# Altium integrated library Altium_Power_Supply_IC.IntLib: 99 symbols (part 2 of 3)
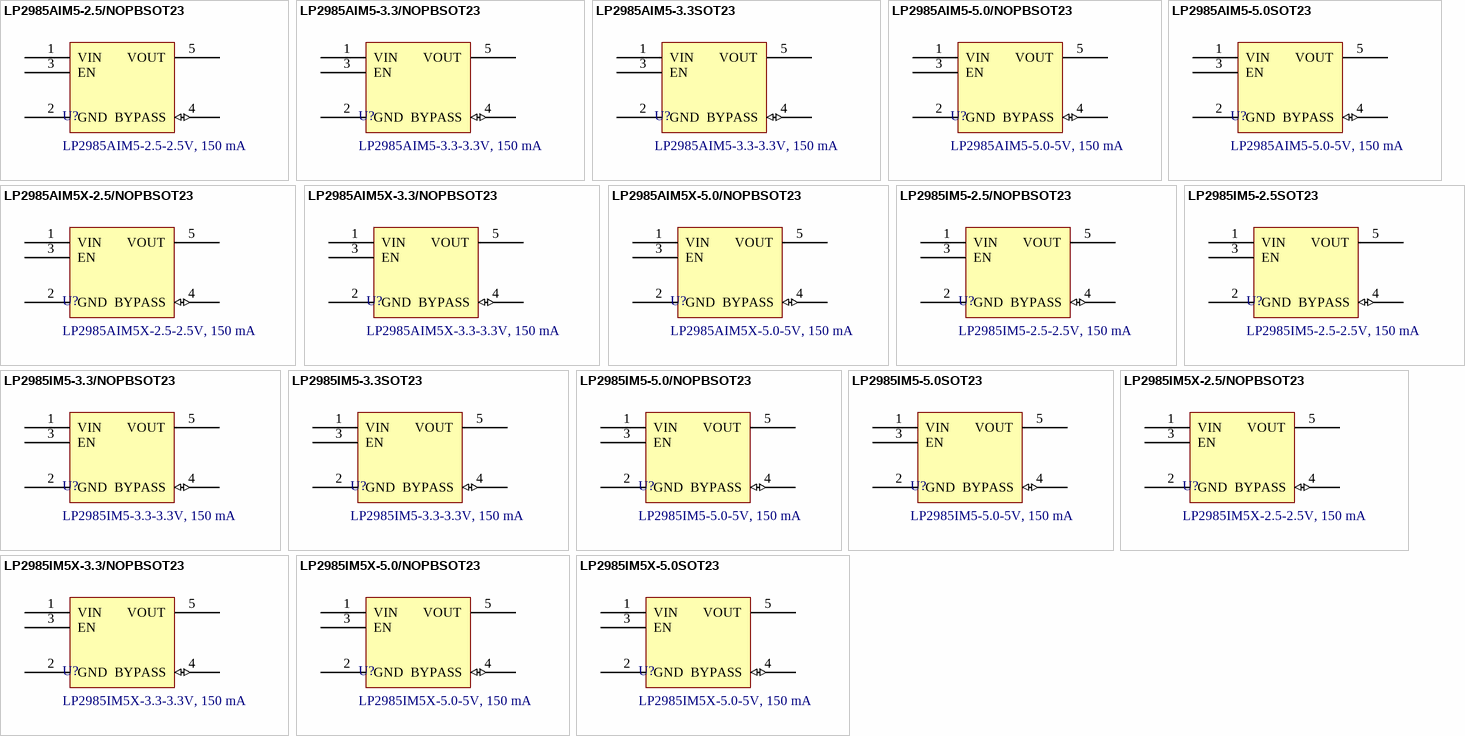
[diagram p12: symbols LP2985AIM5-2.5/NOPBSOT23 to LP2985IM5X-5.0SOT23]

## LP2985AIM5-5.0SOT23
designator U?, comment LP2985AIM5-5.0-5V, 150 mA
Out: 5V, 150 mA max; In: 2.5 V to 16 V; Pacakge: SOT-23-5; Manufacturer: Texas Instruments; Voltage Input: 2.5V - 16V; Current Output: 150 mA; Supplier 1 URL: https://www.mouser.vn/ProductDetail/Texas-Instruments/LP2985AIM5-5.0?qs=7lkVKPoqpba3%2FL%2F%2FI3%252BCew%3D%3D; Supplier 2 URL: https://www.digikey.com/en/products/detail/texas-instruments/LP2985AIM5-5-0/3701435; Supplier 3 URL: N/A; Value: LP2985AIM5-5.0-5V, 150 mA; Voltage Output: 5V; Manufacturer Part Number: LP2985AIM5-5.0; Mount: SMD/SMT; Operating Temperature Max: + 85 C; Operating Temperature Min: - 40 C; Package / Case: SOT-23-5; Packaging: Tape and Reel; Supplier 1: Mouser; Supplier 1 Part Number: 926-LP2985AIM5-50; Supplier 2: Digi-Key; Supplier 2 Part Number: LP2985AIM5-5.0TR-ND; Supplier 3: thegioiic; Supplier 3 Part Number: N/A; ComponentLink1Description: Datasheet; ComponentLink1URL: https://www.ti.com/lit/ds/symlink/lp2985.pdf?ts=1690340207505&ref_url=https%253A%252F%252Fwww.ti.com%252Fproduct%252FLP2985%253FkeyMatch%253DLM2985
footprint SOT23-5 (SOT143-4 as used in SP0503BAHTG)
pins: 1 VIN (power) "Input supply pin. Use a capacitor with a value of 1 µF or larger from this pin to ground.", 2 GND, 3 EN "Enable pin for the LDO. Driving the ON/OFF pin high enables the device. Driving this pin low", 4 BYPASS (io) "BYPASS pin to achieve low noise performance. Connecting an external capacitor between", 5 VOUT (power) "Output of the regulator. Use a capacitor with a value of 2.2 µF or larger from this pin to"

## LP2985AIM5X-2.5/NOPBSOT23
designator U?, comment LP2985AIM5X-2.5-2.5V, 150 mA
Out: 2.5V, 150 mA max; In: 2.5 V to 16 V; Pacakge: SOT-23-5; Manufacturer: Texas Instruments; Voltage Input: 2.5V - 16V; Current Output: 150 mA; Supplier 1 URL: https://www.mouser.vn/ProductDetail/Texas-Instruments/LP2985AIM5X-2.5-NOPB?qs=7lkVKPoqpbYgRY%252BBsOv68w%3D%3D; Supplier 2 URL: https://www.digikey.com/en/products/detail/texas-instruments/LP2985AIM5X-2-5-NOPB/367665; Supplier 3 URL: N/A; Value: LP2985AIM5X-2.5-2.5V, 150 mA; Voltage Output: 2.5V; Manufacturer Part Number: LP2985AIM5X-2.5; Mount: SMD/SMT; Operating Temperature Max: + 85 C; Operating Temperature Min: - 40 C; Package / Case: SOT-23-5; Packaging: Tape and Reel; Supplier 1: Mouser; Supplier 1 Part Number: 926-LP2985AIM5X25NPB; Supplier 2: Digi-Key; Supplier 2 Part Number: 296-LP2985AIM5X-2.5/NOPBTR-ND; Supplier 3: thegioiic; Supplier 3 Part Number: N/A; ComponentLink1Description: Datasheet; ComponentLink1URL: https://www.ti.com/lit/ds/symlink/lp2985.pdf?ts=1690340207505&ref_url=https%253A%252F%252Fwww.ti.com%252Fproduct%252FLP2985%253FkeyMatch%253DLM2985
footprint SOT23-5 (SOT143-4 as used in SP0503BAHTG)
pins: 1 VIN (power) "Input supply pin. Use a capacitor with a value of 1 µF or larger from this pin to ground.", 2 GND, 3 EN "Enable pin for the LDO. Driving the ON/OFF pin high enables the device. Driving this pin low", 4 BYPASS (io) "BYPASS pin to achieve low noise performance. Connecting an external capacitor between", 5 VOUT (power) "Output of the regulator. Use a capacitor with a value of 2.2 µF or larger from this pin to"

## LP2985AIM5X-3.3/NOPBSOT23
designator U?, comment LP2985AIM5X-3.3-3.3V, 150 mA
Out: 3.3V, 150 mA max; In: 2.5 V to 16 V; Pacakge: SOT-23-5; Manufacturer: Texas Instruments; Voltage Input: 2.5V - 16V; Current Output: 150 mA; Supplier 1 URL: https://www.mouser.vn/ProductDetail/Texas-Instruments/LP2985AIM5X-3.3-NOPB?qs=7lkVKPoqpbbp4pIqwI%2FBiQ%3D%3D; Supplier 2 URL: https://www.digikey.com/en/products/detail/texas-instruments/LP2985AIM5X-3-3-NOPB/367668; Supplier 3 URL: https://www.thegioiic.com/lp2985-33dbvr-ic-on-ap-3-3v-150ma; Value: LP2985AIM5X-3.3-3.3V, 150 mA; Voltage Output: 3.3V; Manufacturer Part Number: LP2985AIM5X-3.3; Mount: SMD/SMT; Operating Temperature Max: + 85 C; Operating Temperature Min: - 40 C; Package / Case: SOT-23-5; Packaging: Tape and Reel; Supplier 1: Mouser; Supplier 1 Part Number: 926-LP2985AIM5X33NPB; Supplier 2: Digi-Key; Supplier 2 Part Number: LP2985AIM5X-3.3/NOPBTR-ND; Supplier 3: thegioiic; Supplier 3 Part Number: N/A; ComponentLink1Description: Datasheet; ComponentLink1URL: https://www.ti.com/lit/ds/symlink/lp2985.pdf?ts=1690340207505&ref_url=https%253A%252F%252Fwww.ti.com%252Fproduct%252FLP2985%253FkeyMatch%253DLM2985
footprint SOT23-5 (SOT143-4 as used in SP0503BAHTG)
pins: 1 VIN (power) "Input supply pin. Use a capacitor with a value of 1 µF or larger from this pin to ground.", 2 GND, 3 EN "Enable pin for the LDO. Driving the ON/OFF pin high enables the device. Driving this pin low", 4 BYPASS (io) "BYPASS pin to achieve low noise performance. Connecting an external capacitor between", 5 VOUT (power) "Output of the regulator. Use a capacitor with a value of 2.2 µF or larger from this pin to"

## LP2985AIM5X-5.0/NOPBSOT23
designator U?, comment LP2985AIM5X-5.0-5V, 150 mA
Out: 5V, 150 mA max; In: 2.5 V to 16 V; Pacakge: SOT-23-5; Manufacturer: Texas Instruments; Voltage Input: 2.5V - 16V; Current Output: 150 mA; Supplier 1 URL: https://www.mouser.vn/ProductDetail/Texas-Instruments/LP2985AIM5X-5.0-NOPB?qs=7lkVKPoqpbZIPiotm0OF3A%3D%3D; Supplier 2 URL: https://www.digikey.com/en/products/detail/texas-instruments/LP2985AIM5X-5-0-NOPB/367669; Supplier 3 URL: N/A; Value: LP2985AIM5X-5.0-5V, 150 mA; Voltage Output: 5V; Manufacturer Part Number: LP2985AIM5X-5.0; Mount: SMD/SMT; Operating Temperature Max: + 85 C; Operating Temperature Min: - 40 C; Package / Case: SOT-23-5; Packaging: Tape and Reel; Supplier 1: Mouser; Supplier 1 Part Number: 926-LP2985AIM5X50NPB; Supplier 2: Digi-Key; Supplier 2 Part Number: LP2985AIM5X-5.0/NOPBTR-ND; Supplier 3: thegioiic; Supplier 3 Part Number: N/A; ComponentLink1Description: Datasheet; ComponentLink1URL: https://www.ti.com/lit/ds/symlink/lp2985.pdf?ts=1690340207505&ref_url=https%253A%252F%252Fwww.ti.com%252Fproduct%252FLP2985%253FkeyMatch%253DLM2985
footprint SOT23-5 (SOT143-4 as used in SP0503BAHTG)
pins: 1 VIN (power) "Input supply pin. Use a capacitor with a value of 1 µF or larger from this pin to ground.", 2 GND, 3 EN "Enable pin for the LDO. Driving the ON/OFF pin high enables the device. Driving this pin low", 4 BYPASS (io) "BYPASS pin to achieve low noise performance. Connecting an external capacitor between", 5 VOUT (power) "Output of the regulator. Use a capacitor with a value of 2.2 µF or larger from this pin to"

## LP2985IM5-2.5/NOPBSOT23
designator U?, comment LP2985IM5-2.5-2.5V, 150 mA
Out: 2.5V, 150 mA max; In: 2.5 V to 16 V; Pacakge: SOT-23-5; Manufacturer: Texas Instruments; Voltage Input: 2.5V - 16V; Current Output: 150 mA; Supplier 1 URL: https://www.mouser.vn/ProductDetail/Texas-Instruments/LP2985IM5-2.5-NOPB?qs=7lkVKPoqpbaMRafyDveXFA%3D%3D; Supplier 2 URL: https://www.digikey.com/en/products/detail/texas-instruments/LP2985IM5-2-5-NOPB/364601; Supplier 3 URL: N/A; Value: LP2985IM5-2.5-2.5V, 150 mA; Voltage Output: 2.5V; Manufacturer Part Number: LP2985IM5-2.5; Mount: SMD/SMT; Operating Temperature Max: + 85 C; Operating Temperature Min: - 40 C; Package / Case: SOT-23-5; Packaging: Tape and Reel; Supplier 1: Mouser; Supplier 1 Part Number: 926-2985IM5-2.5/NOPB; Supplier 2: Digi-Key; Supplier 2 Part Number: LP2985IM5-2.5/NOPBTR-ND; Supplier 3: thegioiic; Supplier 3 Part Number: N/A; ComponentLink1Description: Datasheet; ComponentLink1URL: https://www.ti.com/lit/ds/symlink/lp2985.pdf?ts=1690340207505&ref_url=https%253A%252F%252Fwww.ti.com%252Fproduct%252FLP2985%253FkeyMatch%253DLM2985
footprint SOT23-5 (SOT143-4 as used in SP0503BAHTG)
pins: 1 VIN (power) "Input supply pin. Use a capacitor with a value of 1 µF or larger from this pin to ground.", 2 GND, 3 EN "Enable pin for the LDO. Driving the ON/OFF pin high enables the device. Driving this pin low", 4 BYPASS (io) "BYPASS pin to achieve low noise performance. Connecting an external capacitor between", 5 VOUT (power) "Output of the regulator. Use a capacitor with a value of 2.2 µF or larger from this pin to"

## LP2985IM5-2.5SOT23
designator U?, comment LP2985IM5-2.5-2.5V, 150 mA
Out: 2.5V, 150 mA max; In: 2.5 V to 16 V; Pacakge: SOT-23-5; Manufacturer: Texas Instruments; Voltage Input: 2.5V - 16V; Current Output: 150 mA; Supplier 1 URL: https://www.mouser.vn/ProductDetail/Texas-Instruments/LP2985IM5-2.5?qs=7lkVKPoqpbbb%2FE%2FIZr0hmA%3D%3D; Supplier 2 URL: https://www.digikey.com/en/products/detail/texas-instruments/LP2985IM5-2-5/2352713; Supplier 3 URL: N/A; Value: LP2985IM5-2.5-2.5V, 150 mA; Voltage Output: 2.5V; Manufacturer Part Number: LP2985IM5-2.5; Mount: SMD/SMT; Operating Temperature Max: + 85 C; Operating Temperature Min: - 40 C; Package / Case: SOT-23-5; Packaging: Tape and Reel; Supplier 1: Mouser; Supplier 1 Part Number: 926-LP2985IM5-25; Supplier 2: Digi-Key; Supplier 2 Part Number: 296-36265-2-ND; Supplier 3: thegioiic; Supplier 3 Part Number: N/A; ComponentLink1Description: Datasheet; ComponentLink1URL: https://www.ti.com/lit/ds/symlink/lp2985.pdf?ts=1690340207505&ref_url=https%253A%252F%252Fwww.ti.com%252Fproduct%252FLP2985%253FkeyMatch%253DLM2985
footprint SOT23-5 (SOT143-4 as used in SP0503BAHTG)
pins: 1 VIN (power) "Input supply pin. Use a capacitor with a value of 1 µF or larger from this pin to ground.", 2 GND, 3 EN "Enable pin for the LDO. Driving the ON/OFF pin high enables the device. Driving this pin low", 4 BYPASS (io) "BYPASS pin to achieve low noise performance. Connecting an external capacitor between", 5 VOUT (power) "Output of the regulator. Use a capacitor with a value of 2.2 µF or larger from this pin to"

## LP2985IM5-3.3/NOPBSOT23
designator U?, comment LP2985IM5-3.3-3.3V, 150 mA
Out: 3.3V, 150 mA max; In: 2.5 V to 16 V; Pacakge: SOT-23-5; Manufacturer: Texas Instruments; Voltage Input: 2.5V - 16V; Current Output: 150 mA; Supplier 1 URL: https://www.mouser.vn/ProductDetail/Texas-Instruments/LP2985IM5-3.3-NOPB?qs=7lkVKPoqpbYPPbypQ1RJZg%3D%3D; Supplier 2 URL: https://www.digikey.com/en/products/detail/texas-instruments/LP2985IM5-3-3-NOPB/334961?s=N4IgTCBcDaIDIAUwE4AcBWAkgWXQWgGYA6AgegDkB5BAIRAF0BfIA; Supplier 3 URL: https://www.thegioiic.com/lp2985-33dbvr-ic-on-ap-3-3v-150ma; Value: LP2985IM5-3.3-3.3V, 150 mA; Voltage Output: 3.3V; Manufacturer Part Number: LP2985IM5-3.3; Mount: SMD/SMT; Operating Temperature Max: + 85 C; Operating Temperature Min: - 40 C; Package / Case: SOT-23-5; Packaging: Tape and Reel; Supplier 1: Mouser; Supplier 1 Part Number: 926-2985IM5-3.3/NOPB; Supplier 2: Digi-Key; Supplier 2 Part Number: LP2985IM5-3.3/NOPBTR-ND; Supplier 3: thegioiic; Supplier 3 Part Number: N/A; ComponentLink1Description: Datasheet; ComponentLink1URL: https://www.ti.com/lit/ds/symlink/lp2985.pdf?ts=1690340207505&ref_url=https%253A%252F%252Fwww.ti.com%252Fproduct%252FLP2985%253FkeyMatch%253DLM2985
footprint SOT23-5 (SOT143-4 as used in SP0503BAHTG)
pins: 1 VIN (power) "Input supply pin. Use a capacitor with a value of 1 µF or larger from this pin to ground.", 2 GND, 3 EN "Enable pin for the LDO. Driving the ON/OFF pin high enables the device. Driving this pin low", 4 BYPASS (io) "BYPASS pin to achieve low noise performance. Connecting an external capacitor between", 5 VOUT (power) "Output of the regulator. Use a capacitor with a value of 2.2 µF or larger from this pin to"

## LP2985IM5-3.3SOT23
designator U?, comment LP2985IM5-3.3-3.3V, 150 mA
Out: 3.3V, 150 mA max; In: 2.5 V to 16 V; Pacakge: SOT-23-5; Manufacturer: Texas Instruments; Voltage Input: 2.5V - 16V; Current Output: 150 mA; Supplier 1 URL: https://www.mouser.vn/ProductDetail/Texas-Instruments/LP2985IM5-3.3?qs=7lkVKPoqpbYyrbwrqf2JcA%3D%3D; Supplier 2 URL: https://www.digikey.com/en/products/detail/texas-instruments/LP2985IM5-3-3/3701436; Supplier 3 URL: https://www.thegioiic.com/lp2985-33dbvr-ic-on-ap-3-3v-150ma; Value: LP2985IM5-3.3-3.3V, 150 mA; Voltage Output: 3.3V; Manufacturer Part Number: LP2985IM5-3.3; Mount: SMD/SMT; Operating Temperature Max: + 85 C; Operating Temperature Min: - 40 C; Package / Case: SOT-23-5; Packaging: Tape and Reel; Supplier 1: Mouser; Supplier 1 Part Number: 926-LP2985IM5-33; Supplier 2: Digi-Key; Supplier 2 Part Number: LP2985IM5-3.3TR-ND; Supplier 3: thegioiic; Supplier 3 Part Number: N/A; ComponentLink1Description: Datasheet; ComponentLink1URL: https://www.ti.com/lit/ds/symlink/lp2985.pdf?ts=1690340207505&ref_url=https%253A%252F%252Fwww.ti.com%252Fproduct%252FLP2985%253FkeyMatch%253DLM2985
footprint SOT23-5 (SOT143-4 as used in SP0503BAHTG)
pins: 1 VIN (power) "Input supply pin. Use a capacitor with a value of 1 µF or larger from this pin to ground.", 2 GND, 3 EN "Enable pin for the LDO. Driving the ON/OFF pin high enables the device. Driving this pin low", 4 BYPASS (io) "BYPASS pin to achieve low noise performance. Connecting an external capacitor between", 5 VOUT (power) "Output of the regulator. Use a capacitor with a value of 2.2 µF or larger from this pin to"

## LP2985IM5-5.0/NOPBSOT23
designator U?, comment LP2985IM5-5.0-5V, 150 mA
Out: 5V, 150 mA max; In: 2.5 V to 16 V; Pacakge: SOT-23-5; Manufacturer: Texas Instruments; Voltage Input: 2.5V - 16V; Current Output: 150 mA; Supplier 1 URL: https://www.mouser.vn/ProductDetail/Texas-Instruments/LP2985IM5-5.0-NOPB?qs=7lkVKPoqpbY2QdMGYKhTqw%3D%3D; Supplier 2 URL: https://www.digikey.com/en/products/detail/texas-instruments/LP2985IM5-5-0-NOPB/334960?s=N4IgTCBcDaIDIAUwE4AcBWAkgWXQWnQDoAGAegDkB5BAIRAF0BfIA; Supplier 3 URL: N/A; Value: LP2985IM5-5.0-5V, 150 mA; Voltage Output: 5V; Manufacturer Part Number: LP2985IM5-5.0; Mount: SMD/SMT; Operating Temperature Max: + 85 C; Operating Temperature Min: - 40 C; Package / Case: SOT-23-5; Packaging: Tape and Reel; Supplier 1: Mouser; Supplier 1 Part Number: 926-LP2985IM55.0NOPB; Supplier 2: Digi-Key; Supplier 2 Part Number: LP2985IM5-5.0/NOPBTR-ND; Supplier 3: thegioiic; Supplier 3 Part Number: N/A; ComponentLink1Description: Datasheet; ComponentLink1URL: https://www.ti.com/lit/ds/symlink/lp2985.pdf?ts=1690340207505&ref_url=https%253A%252F%252Fwww.ti.com%252Fproduct%252FLP2985%253FkeyMatch%253DLM2985
footprint SOT23-5 (SOT143-4 as used in SP0503BAHTG)
pins: 1 VIN (power) "Input supply pin. Use a capacitor with a value of 1 µF or larger from this pin to ground.", 2 GND, 3 EN "Enable pin for the LDO. Driving the ON/OFF pin high enables the device. Driving this pin low", 4 BYPASS (io) "BYPASS pin to achieve low noise performance. Connecting an external capacitor between", 5 VOUT (power) "Output of the regulator. Use a capacitor with a value of 2.2 µF or larger from this pin to"

## LP2985IM5-5.0SOT23
designator U?, comment LP2985IM5-5.0-5V, 150 mA
Out: 5V, 150 mA max; In: 2.5 V to 16 V; Pacakge: SOT-23-5; Manufacturer: Texas Instruments; Voltage Input: 2.5V - 16V; Current Output: 150 mA; Supplier 1 URL: https://www.mouser.vn/ProductDetail/Texas-Instruments/LP2985IM5-5.0?qs=7lkVKPoqpbb8j6wBLu7kIA%3D%3D; Supplier 2 URL: https://www.digikey.com/en/products/detail/texas-instruments/LP2985IM5-5-0/3701437; Supplier 3 URL: N/A; Value: LP2985IM5-5.0-5V, 150 mA; Voltage Output: 5V; Manufacturer Part Number: LP2985IM5-5.0; Mount: SMD/SMT; Operating Temperature Max: + 85 C; Operating Temperature Min: - 40 C; Package / Case: SOT-23-5; Packaging: Tape and Reel; Supplier 1: Mouser; Supplier 1 Part Number: 926-LP2985IM5-50; Supplier 2: Digi-Key; Supplier 2 Part Number: LP2985IM5-5.0TR-ND; Supplier 3: thegioiic; Supplier 3 Part Number: N/A; ComponentLink1Description: Datasheet; ComponentLink1URL: https://www.ti.com/lit/ds/symlink/lp2985.pdf?ts=1690340207505&ref_url=https%253A%252F%252Fwww.ti.com%252Fproduct%252FLP2985%253FkeyMatch%253DLM2985
footprint SOT23-5 (SOT143-4 as used in SP0503BAHTG)
pins: 1 VIN (power) "Input supply pin. Use a capacitor with a value of 1 µF or larger from this pin to ground.", 2 GND, 3 EN "Enable pin for the LDO. Driving the ON/OFF pin high enables the device. Driving this pin low", 4 BYPASS (io) "BYPASS pin to achieve low noise performance. Connecting an external capacitor between", 5 VOUT (power) "Output of the regulator. Use a capacitor with a value of 2.2 µF or larger from this pin to"

## LP2985IM5X-2.5/NOPBSOT23
designator U?, comment LP2985IM5X-2.5-2.5V, 150 mA
Out: 2.5V, 150 mA max; In: 2.5 V to 16 V; Pacakge: SOT-23-5; Manufacturer: Texas Instruments; Voltage Input: 2.5V - 16V; Current Output: 150 mA; Supplier 1 URL: https://www.mouser.vn/ProductDetail/Texas-Instruments/LP2985IM5X-2.5-NOPB?qs=7lkVKPoqpbaNr2n6OKnAUQ%3D%3D; Supplier 2 URL: https://www.digikey.com/en/products/detail/texas-instruments/LP2985IM5X-2-5-NOPB/367675?s=N4IgTCBcDaIDIAUwE4AcBWAkgWXQDQFowA6dAegDkB5BAIRAF0BfIA; Supplier 3 URL: N/A; Value: LP2985IM5X-2.5-2.5V, 150 mA; Voltage Output: 2.5V; Manufacturer Part Number: LP2985IM5X-2.5; Mount: SMD/SMT; Operating Temperature Max: + 85 C; Operating Temperature Min: - 40 C; Package / Case: SOT-23-5; Packaging: Tape and Reel; Supplier 1: Mouser; Supplier 1 Part Number: 926-LP2985IM5X25NOPB; Supplier 2: Digi-Key; Supplier 2 Part Number: 296-37597-2-ND; Supplier 3: thegioiic; Supplier 3 Part Number: N/A; ComponentLink1Description: Datasheet; ComponentLink1URL: https://www.ti.com/lit/ds/symlink/lp2985.pdf?ts=1690340207505&ref_url=https%253A%252F%252Fwww.ti.com%252Fproduct%252FLP2985%253FkeyMatch%253DLM2985
footprint SOT23-5 (SOT143-4 as used in SP0503BAHTG)
pins: 1 VIN (power) "Input supply pin. Use a capacitor with a value of 1 µF or larger from this pin to ground.", 2 GND, 3 EN "Enable pin for the LDO. Driving the ON/OFF pin high enables the device. Driving this pin low", 4 BYPASS (io) "BYPASS pin to achieve low noise performance. Connecting an external capacitor between", 5 VOUT (power) "Output of the regulator. Use a capacitor with a value of 2.2 µF or larger from this pin to"

## LP2985IM5X-3.3/NOPBSOT23
designator U?, comment LP2985IM5X-3.3-3.3V, 150 mA
Out: 3.3V, 150 mA max; In: 2.5 V to 16 V; Pacakge: SOT-23-5; Manufacturer: Texas Instruments; Voltage Input: 2.5V - 16V; Current Output: 150 mA; Supplier 1 URL: https://www.mouser.vn/ProductDetail/Texas-Instruments/LP2985IM5X-3.3-NOPB?qs=7lkVKPoqpbarYOItF3geeg%3D%3D; Supplier 2 URL: https://www.digikey.com/en/products/detail/texas-instruments/LP2985IM5X-3-3-NOPB/367679; Supplier 3 URL: https://www.thegioiic.com/lp2985-33dbvr-ic-on-ap-3-3v-150ma; Value: LP2985IM5X-3.3-3.3V, 150 mA; Voltage Output: 3.3V; Manufacturer Part Number: LP2985IM5X-3.3; Mount: SMD/SMT; Operating Temperature Max: + 85 C; Operating Temperature Min: - 40 C; Package / Case: SOT-23-5; Packaging: Tape and Reel; Supplier 1: Mouser; Supplier 1 Part Number: 926-LP2985IM5X33NOPB; Supplier 2: Digi-Key; Supplier 2 Part Number: LP2985IM5X-3.3/NOPBTR-ND; Supplier 3: thegioiic; Supplier 3 Part Number: N/A; ComponentLink1Description: Datasheet; ComponentLink1URL: https://www.ti.com/lit/ds/symlink/lp2985.pdf?ts=1690340207505&ref_url=https%253A%252F%252Fwww.ti.com%252Fproduct%252FLP2985%253FkeyMatch%253DLM2985
footprint SOT23-5 (SOT143-4 as used in SP0503BAHTG)
pins: 1 VIN (power) "Input supply pin. Use a capacitor with a value of 1 µF or larger from this pin to ground.", 2 GND, 3 EN "Enable pin for the LDO. Driving the ON/OFF pin high enables the device. Driving this pin low", 4 BYPASS (io) "BYPASS pin to achieve low noise performance. Connecting an external capacitor between", 5 VOUT (power) "Output of the regulator. Use a capacitor with a value of 2.2 µF or larger from this pin to"

## LP2985IM5X-5.0/NOPBSOT23
designator U?, comment LP2985IM5X-5.0-5V, 150 mA
Out: 5V, 150 mA max; In: 2.5 V to 16 V; Pacakge: SOT-23-5; Manufacturer: Texas Instruments; Voltage Input: 2.5V - 16V; Current Output: 150 mA; Supplier 1 URL: https://www.mouser.vn/ProductDetail/Texas-Instruments/LP2985IM5X-5.0-NOPB?qs=7lkVKPoqpbZqObksDd83dw%3D%3D; Supplier 2 URL: https://www.digikey.com/en/products/detail/texas-instruments/LP2985IM5X-5-0-NOPB/367680; Supplier 3 URL: N/A; Value: LP2985IM5X-5.0-5V, 150 mA; Voltage Output: 5V; Manufacturer Part Number: LP2985IM5X-5.0; Mount: SMD/SMT; Operating Temperature Max: + 85 C; Operating Temperature Min: - 40 C; Package / Case: SOT-23-5; Packaging: Tape and Reel; Supplier 1: Mouser; Supplier 1 Part Number: 926-LP2985IM5X50NOPB; Supplier 2: Digi-Key; Supplier 2 Part Number: LP2985IM5X-5.0/NOPBTR-ND; Supplier 3: thegioiic; Supplier 3 Part Number: N/A; ComponentLink1Description: Datasheet; ComponentLink1URL: https://www.ti.com/lit/ds/symlink/lp2985.pdf?ts=1690340207505&ref_url=https%253A%252F%252Fwww.ti.com%252Fproduct%252FLP2985%253FkeyMatch%253DLM2985
footprint SOT23-5 (SOT143-4 as used in SP0503BAHTG)
pins: 1 VIN (power) "Input supply pin. Use a capacitor with a value of 1 µF or larger from this pin to ground.", 2 GND, 3 EN "Enable pin for the LDO. Driving the ON/OFF pin high enables the device. Driving this pin low", 4 BYPASS (io) "BYPASS pin to achieve low noise performance. Connecting an external capacitor between", 5 VOUT (power) "Output of the regulator. Use a capacitor with a value of 2.2 µF or larger from this pin to"

## LP2985IM5X-5.0SOT23
designator U?, comment LP2985IM5X-5.0-5V, 150 mA
Out: 5V, 150 mA max; In: 2.5 V to 16 V; Pacakge: SOT-23-5; Manufacturer: Texas Instruments; Voltage Input: 2.5V - 16V; Current Output: 150 mA; Supplier 1 URL: https://www.mouser.vn/ProductDetail/Texas-Instruments/LP2985IM5X-5.0?qs=7lkVKPoqpba%2FtUPktpLnaw%3D%3D; Supplier 2 URL: https://www.digikey.com/en/products/detail/texas-instruments/LP2985IM5X-5-0/3697186; Supplier 3 URL: N/A; Value: LP2985IM5X-5.0-5V, 150 mA; Voltage Output: 5V; Manufacturer Part Number: LP2985IM5X-5.0; Mount: SMD/SMT; Operating Temperature Max: + 85 C; Operating Temperature Min: - 40 C; Package / Case: SOT-23-5; Packaging: Tape and Reel; Supplier 1: Mouser; Supplier 1 Part Number: 926-LP2985IM5X-50; Supplier 2: Digi-Key; Supplier 2 Part Number: LP2985IM5X-5.0TR-ND; Supplier 3: thegioiic; Supplier 3 Part Number: N/A; ComponentLink1Description: Datasheet; ComponentLink1URL: https://www.ti.com/lit/ds/symlink/lp2985.pdf?ts=1690340207505&ref_url=https%253A%252F%252Fwww.ti.com%252Fproduct%252FLP2985%253FkeyMatch%253DLM2985
footprint SOT23-5 (SOT143-4 as used in SP0503BAHTG)
pins: 1 VIN (power) "Input supply pin. Use a capacitor with a value of 1 µF or larger from this pin to ground.", 2 GND, 3 EN "Enable pin for the LDO. Driving the ON/OFF pin high enables the device. Driving this pin low", 4 BYPASS (io) "BYPASS pin to achieve low noise performance. Connecting an external capacitor between", 5 VOUT (power) "Output of the regulator. Use a capacitor with a value of 2.2 µF or larger from this pin to"


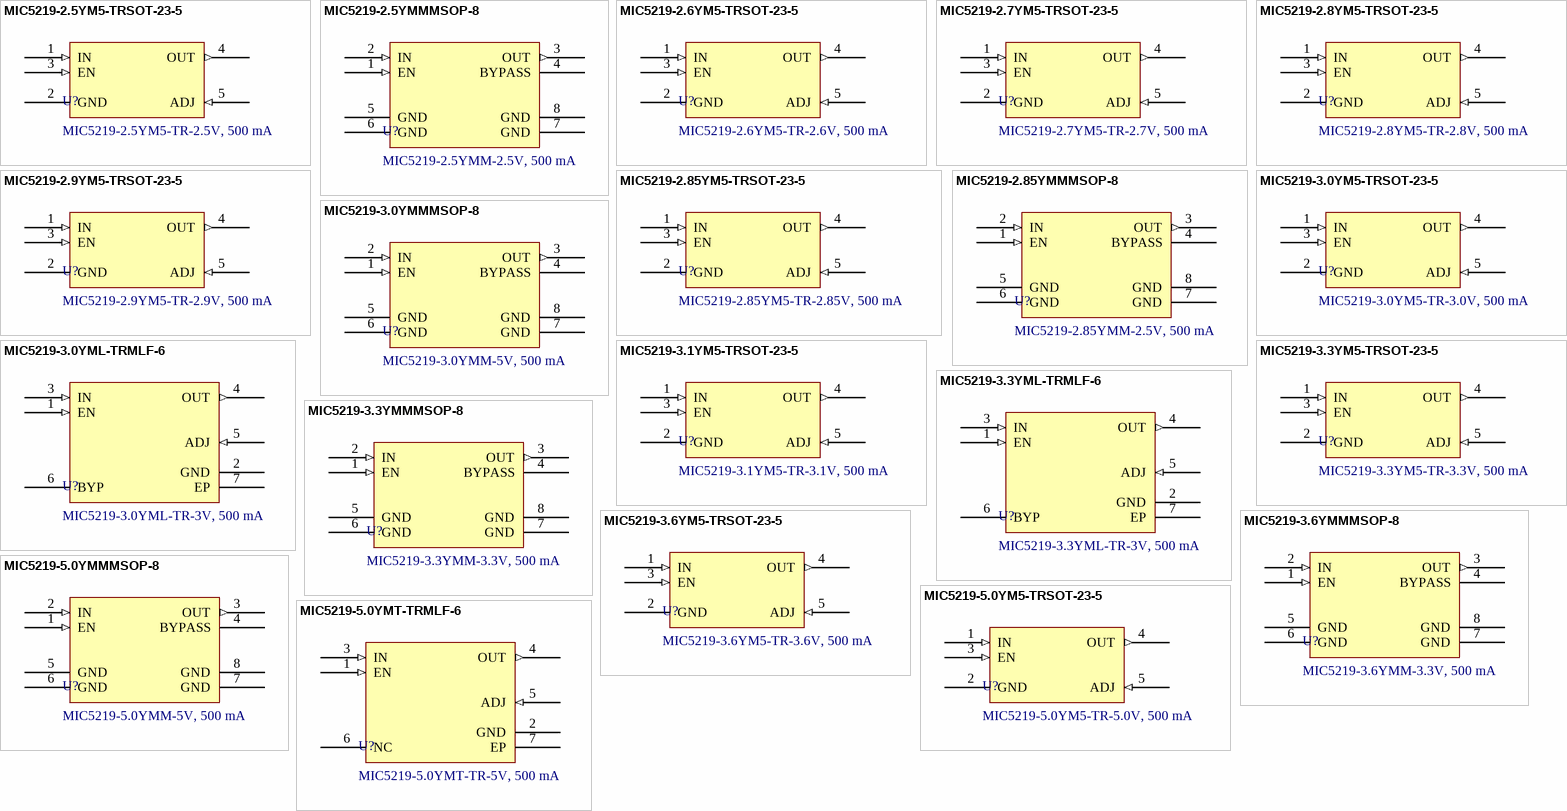
[diagram p7: symbols MIC5219-2.5YM5-TRSOT-23-5 to MIC5219-5.0YMT-TRMLF-6]

## MIC5219-2.5YM5-TRSOT-23-5
designator U?, comment MIC5219-2.5YM5-TR-2.5V, 500 mA
MIC5219-x family LDO Voltage Regulators, 2.5V output; Manufacturer: Microchip; PSRR: 75 dB; Dropout Voltage: 350-600 mV; Current Output: 500 mA; Voltage Input: 2.5V - 12V; Package / Case: SOT-23-5; Supplier 1 URL: https://www.mouser.vn/ProductDetail/Microchip-Technology/MIC5219-2.5YM5-TR?qs=U6T8BxXiZAXURjP%2FxpAn8w%3D%3D; Supplier 2 URL: https://www.digikey.com/en/products/detail/microchip-technology/MIC5219-2-5YM5-TR/1030543?s=N4IgTCBcDaILIEkDCBWMBGAnAWjAOhQE04VsAVAJRAF0BfIA; Supplier 3 URL: N/A; Value: MIC5219-2.5YM5-TR-2.5V, 500 mA; Voltage Output: 2.5V; Manufacturer Part Number: MIC5219-2.5YM5-TR; Mount: SMD/SMT; Operating Temperature Max: + 85 C; Operating Temperature Min: - 40 C; Supplier 1: Mouser; Supplier 1 Part Number: 998-MIC5219-2.5YM5TR; Supplier 2: Digi-Key; Supplier 2 Part Number: 576-2758-2-ND; Supplier 3: thegioiic; Supplier 3 Part Number: N/A; ComponentLink1Description: Datasheet; ComponentLink1URL: https://ww1.microchip.com/downloads/en/DeviceDoc/MIC5219-500mA-Peak-Output-LDO-Regulator-DS20006021A.pdf
footprint MIC5219-x.xYM5 (MIC5219-x.xYM5, SOT-23-5)
pins: 1 IN (in), 2 GND (power), 3 EN (in), 4 OUT (out), 5 ADJ (in)

## MIC5219-2.5YMMMSOP-8
designator U?, comment MIC5219-2.5YMM-2.5V, 500 mA
MIC5219-x family LDO Voltage Regulators, 2.5V output; Manufacturer: Microchip; PSRR: 75 dB; Dropout Voltage: 350-600 mV; Current Output: 500 mA; Voltage Input: 2.5V - 12V; Package / Case: MSOP-8; Supplier 1 URL: https://www.mouser.vn/ProductDetail/Microchip-Technology/MIC5219-2.5YMM?qs=kh6iOki%2FeLGSwVLHtzUtsQ%3D%3D; Supplier 2 URL: https://www.digikey.com/en/products/detail/microchip-technology/MIC5219-2-5YMM/1030544; Supplier 3 URL: N/A; Value: MIC5219-2.5YMM-2.5V, 500 mA; Voltage Output: 2.5V; Manufacturer Part Number: MIC5219-2.5YMM; Mount: SMD/SMT; Operating Temperature Max: + 85 C; Operating Temperature Min: - 40 C; Supplier 1: Mouser; Supplier 1 Part Number: 998-MIC5219-2.5YMM; Supplier 2: Digi-Key; Supplier 2 Part Number: 576-2376-ND; Supplier 3: thegioiic; Supplier 3 Part Number: N/A; ComponentLink1Description: Datasheet; ComponentLink1URL: https://ww1.microchip.com/downloads/en/DeviceDoc/MIC5219-500mA-Peak-Output-LDO-Regulator-DS20006021A.pdf
footprint MIC5219-x.xYMM (MIC5219-x.xYMM, SOT-23-5)
pins: 1 EN (in), 2 IN (in), 3 OUT (out), 4 BYPASS, 5 GND (power), 6 GND (power), 7 GND (power), 8 GND (power)

## MIC5219-2.6YM5-TRSOT-23-5
designator U?, comment MIC5219-2.6YM5-TR-2.6V, 500 mA
MIC5219-x family LDO Voltage Regulators, 2.6V output; Manufacturer: Microchip; PSRR: 75 dB; Dropout Voltage: 350-600 mV; Current Output: 500 mA; Voltage Input: 2.5V - 12V; Package / Case: SOT-23-5; Supplier 1 URL: https://www.mouser.vn/ProductDetail/Microchip-Technology/MIC5219-2.6YM5-TR?qs=U6T8BxXiZAU94MGLjAqlLA%3D%3D; Supplier 2 URL: https://www.digikey.com/en/products/detail/microchip-technology/MIC5219-2-6YM5-TR/1030548?s=N4IgTCBcDaILIEkDCBWMBGAnAWjAOgDYBNOFbAFQCUQBdAXyA; Supplier 3 URL: N/A; Value: MIC5219-2.6YM5-TR-2.6V, 500 mA; Voltage Output: 2.6V; Manufacturer Part Number: MIC5219-2.6YM5-TR; Mount: SMD/SMT; Operating Temperature Max: + 85 C; Operating Temperature Min: - 40 C; Supplier 1: Mouser; Supplier 1 Part Number: 998-MIC5219-2.6YM5TR; Supplier 2: Digi-Key; Supplier 2 Part Number: 576-2759-2-ND; Supplier 3: thegioiic; Supplier 3 Part Number: N/A; ComponentLink1Description: Datasheet; ComponentLink1URL: https://ww1.microchip.com/downloads/en/DeviceDoc/MIC5219-500mA-Peak-Output-LDO-Regulator-DS20006021A.pdf
footprint MIC5219-x.xYM5 (MIC5219-x.xYM5, SOT-23-5)
pins: 1 IN (in), 2 GND (power), 3 EN (in), 4 OUT (out), 5 ADJ (in)

## MIC5219-2.7YM5-TRSOT-23-5
designator U?, comment MIC5219-2.7YM5-TR-2.7V, 500 mA
MIC5219-x family LDO Voltage Regulators, 2.7V output; Manufacturer: Microchip; PSRR: 75 dB; Dropout Voltage: 350-600 mV; Current Output: 500 mA; Voltage Input: 2.5V - 12V; Package / Case: SOT-23-5; Supplier 1 URL: https://www.mouser.vn/ProductDetail/Microchip-Technology/MIC5219-2.7YM5-TR?qs=U6T8BxXiZAX%2Fh5H9qQkMlQ%3D%3D; Supplier 2 URL: https://www.digikey.com/en/products/detail/microchip-technology/MIC5219-2-7YM5-TR/1030550?s=N4IgTCBcDaILIEkDCBWMBGAnAWjAOgHYBNOFbAFQCUQBdAXyA; Supplier 3 URL: N/A; Value: MIC5219-2.7YM5-TR-2.7V, 500 mA; Voltage Output: 2.7V; Manufacturer Part Number: MIC5219-2.7YM5-TR; Mount: SMD/SMT; Operating Temperature Max: + 85 C; Operating Temperature Min: - 40 C; Supplier 1: Mouser; Supplier 1 Part Number: 998-MIC5219-2.7YM5TR; Supplier 2: Digi-Key; Supplier 2 Part Number: 576-2760-2-ND; Supplier 3: thegioiic; Supplier 3 Part Number: N/A; ComponentLink1Description: Datasheet; ComponentLink1URL: https://ww1.microchip.com/downloads/en/DeviceDoc/MIC5219-500mA-Peak-Output-LDO-Regulator-DS20006021A.pdf
footprint MIC5219-x.xYM5 (MIC5219-x.xYM5, SOT-23-5)
pins: 1 IN (in), 2 GND (power), 3 EN (in), 4 OUT (out), 5 ADJ (in)

## MIC5219-2.8YM5-TRSOT-23-5
designator U?, comment MIC5219-2.8YM5-TR-2.8V, 500 mA
MIC5219-x family LDO Voltage Regulators, 2.8V output; Manufacturer: Microchip; PSRR: 75 dB; Dropout Voltage: 350-600 mV; Current Output: 500 mA; Voltage Input: 2.5V - 12V; Package / Case: SOT-23-5; Supplier 1 URL: https://www.mouser.vn/ProductDetail/Microchip-Technology/MIC5219-2.8YM5-TR?qs=U6T8BxXiZAXy80gOmotftg%3D%3D; Supplier 2 URL: https://www.digikey.com/en/products/detail/microchip-technology/MIC5219-2-8YM5-TR/1030559?s=N4IgTCBcDaILIEkDCBWMBGAnAWjAOgA4BNOFbAFQCUQBdAXyA; Supplier 3 URL: N/A; Value: MIC5219-2.8YM5-TR-2.8V, 500 mA; Voltage Output: 2.8V; Manufacturer Part Number: MIC5219-2.8YM5-TR; Mount: SMD/SMT; Operating Temperature Max: + 85 C; Operating Temperature Min: - 40 C; Supplier 1: Mouser; Supplier 1 Part Number: 998-MIC5219-2.8YM5TR; Supplier 2: Digi-Key; Supplier 2 Part Number: 576-2762-2-ND; Supplier 3: thegioiic; Supplier 3 Part Number: N/A; ComponentLink1Description: Datasheet; ComponentLink1URL: https://ww1.microchip.com/downloads/en/DeviceDoc/MIC5219-500mA-Peak-Output-LDO-Regulator-DS20006021A.pdf
footprint MIC5219-x.xYM5 (MIC5219-x.xYM5, SOT-23-5)
pins: 1 IN (in), 2 GND (power), 3 EN (in), 4 OUT (out), 5 ADJ (in)

## MIC5219-2.9YM5-TRSOT-23-5
designator U?, comment MIC5219-2.9YM5-TR-2.9V, 500 mA
MIC5219-x family LDO Voltage Regulators, 2.9V output; Manufacturer: Microchip; PSRR: 75 dB; Dropout Voltage: 350-600 mV; Current Output: 500 mA; Voltage Input: 2.5V - 12V; Package / Case: SOT-23-5; Supplier 1 URL: https://www.mouser.vn/ProductDetail/Microchip-Technology/MIC5219-2.9YM5-TR?qs=U6T8BxXiZAUu28ZTWpa0Sw%3D%3D; Supplier 2 URL: https://www.digikey.com/en/products/detail/microchip-technology/MIC5219-2-9YM5-TR/1030562?s=N4IgTCBcDaILIEkDCBWMBGAnAWjAOkwE04VsAVAJRAF0BfIA; Supplier 3 URL: N/A; Value: MIC5219-2.9YM5-TR-2.9V, 500 mA; Voltage Output: 2.9V; Manufacturer Part Number: MIC5219-2.9YM5-TR; Mount: SMD/SMT; Operating Temperature Max: + 85 C; Operating Temperature Min: - 40 C; Supplier 1: Mouser; Supplier 1 Part Number: 998-MIC5219-2.9YM5TR; Supplier 2: Digi-Key; Supplier 2 Part Number: 576-2764-2-ND; Supplier 3: thegioiic; Supplier 3 Part Number: N/A; ComponentLink1Description: Datasheet; ComponentLink1URL: https://ww1.microchip.com/downloads/en/DeviceDoc/MIC5219-500mA-Peak-Output-LDO-Regulator-DS20006021A.pdf
footprint MIC5219-x.xYM5 (MIC5219-x.xYM5, SOT-23-5)
pins: 1 IN (in), 2 GND (power), 3 EN (in), 4 OUT (out), 5 ADJ (in)

## MIC5219-2.85YM5-TRSOT-23-5
designator U?, comment MIC5219-2.85YM5-TR-2.85V, 500 mA
MIC5219-x family LDO Voltage Regulators, 2.85V output; Manufacturer: Microchip; PSRR: 75 dB; Dropout Voltage: 350-600 mV; Current Output: 500 mA; Voltage Input: 2.5V - 12V; Package / Case: SOT-23-5; Supplier 1 URL: https://www.digikey.com/en/products/detail/microchip-technology/MIC5219-2-85YM5-TR/5700955; Supplier 2 URL: https://www.digikey.com/en/products/detail/microchip-technology/MIC5219-2-85YM5-TR/5700955; Supplier 3 URL: N/A; Value: MIC5219-2.85YM5-TR-2.85V, 500 mA; Voltage Output: 2.85V; Manufacturer Part Number: MIC5219-2.85YM5-TR; Mount: SMD/SMT; Operating Temperature Max: + 85 C; Operating Temperature Min: - 40 C; Supplier 1: Mouser; Supplier 1 Part Number: 998-MIC52192.85YM5TR; Supplier 2: Digi-Key; Supplier 2 Part Number: 576-2761-2-ND; Supplier 3: thegioiic; Supplier 3 Part Number: N/A; ComponentLink1Description: Datasheet; ComponentLink1URL: https://ww1.microchip.com/downloads/en/DeviceDoc/MIC5219-500mA-Peak-Output-LDO-Regulator-DS20006021A.pdf
footprint MIC5219-x.xYM5 (MIC5219-x.xYM5, SOT-23-5)
pins: 1 IN (in), 2 GND (power), 3 EN (in), 4 OUT (out), 5 ADJ (in)

## MIC5219-2.85YMMMSOP-8
designator U?, comment MIC5219-2.85YMM-2.5V, 500 mA
MIC5219-x family LDO Voltage Regulators, 2.85V output; Manufacturer: Microchip; PSRR: 75 dB; Dropout Voltage: 350-600 mV; Voltage Output: 2.5V; Current Output: 500 mA; Voltage Input: 2.5V - 12V; Package / Case: MSOP-8; Supplier 1 URL: https://www.mouser.vn/ProductDetail/Microchip-Technology/MIC5219-2.85YMM?qs=kh6iOki%2FeLGFTrYYM9DwNg%3D%3D; Supplier 2 URL: https://www.digikey.com/en/products/detail/microchip-technology/MIC5219-2-85YMM/1030555; Supplier 3 URL: N/A; Value: MIC5219-2.85YMM-2.5V, 500 mA; Manufacturer Part Number: MIC5219-2.85YMM; Mount: SMD/SMT; Operating Temperature Max: + 85 C; Operating Temperature Min: - 40 C; Supplier 1: Mouser; Supplier 1 Part Number: 998-MIC5219-2.85YMM; Supplier 2: Digi-Key; Supplier 2 Part Number: MIC5219-2.85YMM-ND; Supplier 3: thegioiic; Supplier 3 Part Number: N/A; ComponentLink1Description: Datasheet; ComponentLink1URL: https://ww1.microchip.com/downloads/en/DeviceDoc/MIC5219-500mA-Peak-Output-LDO-Regulator-DS20006021A.pdf
footprint MIC5219-x.xYMM (MIC5219-x.xYMM, SOT-23-5)
pins: 1 EN (in), 2 IN (in), 3 OUT (out), 4 BYPASS, 5 GND (power), 6 GND (power), 7 GND (power), 8 GND (power)

## MIC5219-3.0YM5-TRSOT-23-5
designator U?, comment MIC5219-3.0YM5-TR-3.0V, 500 mA
MIC5219-x family LDO Voltage Regulators, 3.0V output; Manufacturer: Microchip; PSRR: 75 dB; Dropout Voltage: 350-600 mV; Current Output: 500 mA; Voltage Input: 2.5V - 12V; Package / Case: SOT-23-5; Supplier 1 URL: https://www.mouser.vn/ProductDetail/Microchip-Technology/MIC5219-3.0YM5-TR?qs=U6T8BxXiZAWAOOoEZYaLhA%3D%3D; Supplier 2 URL: https://www.digikey.com/en/products/detail/microchip-technology/MIC5219-3-0YM5-TR/1030566?s=N4IgTCBcDaILIEkDCBWMBGAnAWgMwDoAGATThWwBUAlEAXQF8g; Supplier 3 URL: N/A; Value: MIC5219-3.0YM5-TR-3.0V, 500 mA; Voltage Output: 3.0V; Manufacturer Part Number: MIC5219-3.0YM5-TR; Mount: SMD/SMT; Operating Temperature Max: + 85 C; Operating Temperature Min: - 40 C; Supplier 1: Mouser; Supplier 1 Part Number: 998-MIC5219-3.0YM5TR; Supplier 2: Digi-Key; Supplier 2 Part Number: 576-2765-2-ND; Supplier 3: thegioiic; Supplier 3 Part Number: N/A; ComponentLink1Description: Datasheet; ComponentLink1URL: https://ww1.microchip.com/downloads/en/DeviceDoc/MIC5219-500mA-Peak-Output-LDO-Regulator-DS20006021A.pdf
footprint MIC5219-x.xYM5 (MIC5219-x.xYM5, SOT-23-5)
pins: 1 IN (in), 2 GND (power), 3 EN (in), 4 OUT (out), 5 ADJ (in)

## MIC5219-3.0YML-TRMLF-6
designator U?, comment MIC5219-3.0YML-TR-3V, 500 mA
MIC5219-x family LDO Voltage Regulators, 3.0V output; Manufacturer: Microchip; PSRR: 75 dB; Dropout Voltage: 350-600 mV; Voltage Output: 3V; Current Output: 500 mA; Voltage Input: 2.5V - 12V; Package / Case: MLF-6; Supplier 1 URL: https://www.mouser.vn/ProductDetail/Microchip-Technology/MIC5219-3.0YML-TR?qs=U6T8BxXiZAWwN17UQBAcEg%3D%3D; Supplier 2 URL: https://www.digikey.com/en/products/detail/microchip-technology/MIC5219-3-0YML-TR/1030567?s=N4IgTCBcDaILIEkDCBWMBGAnAWgMwDoAGATTgBlsAVAJRAF0BfIA; Supplier 3 URL: N/A; Value: MIC5219-3.0YML-TR-3V, 500 mA; Manufacturer Part Number: MIC5219-3.0YML-TR; Mount: SMD/SMT; Operating Temperature Max: + 85 C; Operating Temperature Min: - 40 C; Supplier 1: Mouser; Supplier 1 Part Number: 998-MIC5219-3.0YMLTR; Supplier 2: Digi-Key; Supplier 2 Part Number: 576-2766-2-ND; Supplier 3: thegioiic; Supplier 3 Part Number: N/A; ComponentLink1Description: Datasheet; ComponentLink1URL: https://ww1.microchip.com/downloads/en/DeviceDoc/MIC5219-500mA-Peak-Output-LDO-Regulator-DS20006021A.pdf
footprint MIC5219-x.xYML/MT (MIC5219-x.xYML/MT, 6-Pin MLF)
pins: 1 EN (in), 2 GND (power), 3 IN (in), 4 OUT (out), 5 ADJ (in), 6 BYP, 7 EP (power)

## MIC5219-3.0YMMMSOP-8
designator U?, comment MIC5219-3.0YMM-5V, 500 mA
MIC5219-x family LDO Voltage Regulators, 3.0V output; Manufacturer: Microchip; PSRR: 75 dB; Dropout Voltage: 350-600 mV; Voltage Output: 5V; Current Output: 500 mA; Voltage Input: 2.5V - 12V; Package / Case: MSOP-8; Supplier 1 URL: https://www.mouser.vn/ProductDetail/Microchip-Technology/MIC5219-3.0YMM?qs=kh6iOki%2FeLGPfoR%2FMRsl%252BQ%3D%3D; Supplier 2 URL: https://www.digikey.com/en/products/detail/microchip-technology/MIC5219-3-0YMM/1030568; Supplier 3 URL: N/A; Value: MIC5219-3.0YMM-5V, 500 mA; Manufacturer Part Number: MIC5219-3.0YMM; Mount: SMD/SMT; Operating Temperature Max: + 85 C; Operating Temperature Min: - 40 C; Supplier 1: Mouser; Supplier 1 Part Number: 998-MIC5219-3.0YMM; Supplier 2: Digi-Key; Supplier 2 Part Number: MIC5219-3.0YMM-ND; Supplier 3: thegioiic; Supplier 3 Part Number: N/A; ComponentLink1Description: Datasheet; ComponentLink1URL: https://ww1.microchip.com/downloads/en/DeviceDoc/MIC5219-500mA-Peak-Output-LDO-Regulator-DS20006021A.pdf
footprint MIC5219-x.xYMM (MIC5219-x.xYMM, SOT-23-5)
pins: 1 EN (in), 2 IN (in), 3 OUT (out), 4 BYPASS, 5 GND (power), 6 GND (power), 7 GND (power), 8 GND (power)

## MIC5219-3.1YM5-TRSOT-23-5
designator U?, comment MIC5219-3.1YM5-TR-3.1V, 500 mA
MIC5219-x family LDO Voltage Regulators, 3.1V output; Manufacturer: Microchip; PSRR: 75 dB; Dropout Voltage: 350-600 mV; Current Output: 500 mA; Voltage Input: 2.5V - 12V; Package / Case: SOT-23-5; Supplier 1 URL: https://www.mouser.vn/ProductDetail/Microchip-Technology/MIC5219-3.1YM5-TR?qs=U6T8BxXiZAXAsa136zQ9lw%3D%3D; Supplier 2 URL: https://www.digikey.com/en/products/detail/microchip-technology/MIC5219-3-1YM5-TR/1030570?s=N4IgTCBcDaILIEkDCBWMBGAnAWgMwDp0BNOFbAFQCUQBdAXyA; Supplier 3 URL: N/A; Value: MIC5219-3.1YM5-TR-3.1V, 500 mA; Voltage Output: 3.1V; Manufacturer Part Number: MIC5219-3.1YM5-TR; Mount: SMD/SMT; Operating Temperature Max: + 85 C; Operating Temperature Min: - 40 C; Supplier 1: Mouser; Supplier 1 Part Number: 998-MIC5219-3.1YM5TR; Supplier 2: Digi-Key; Supplier 2 Part Number: 576-2767-2-ND; Supplier 3: thegioiic; Supplier 3 Part Number: N/A; ComponentLink1Description: Datasheet; ComponentLink1URL: https://ww1.microchip.com/downloads/en/DeviceDoc/MIC5219-500mA-Peak-Output-LDO-Regulator-DS20006021A.pdf
footprint MIC5219-x.xYM5 (MIC5219-x.xYM5, SOT-23-5)
pins: 1 IN (in), 2 GND (power), 3 EN (in), 4 OUT (out), 5 ADJ (in)

## MIC5219-3.3YM5-TRSOT-23-5
designator U?, comment MIC5219-3.3YM5-TR-3.3V, 500 mA
MIC5219-x family LDO Voltage Regulators, 3.3V output; Manufacturer: Microchip; PSRR: 75 dB; Dropout Voltage: 350-600 mV; Current Output: 500 mA; Voltage Input: 2.5V - 12V; Package / Case: SOT-23-5; Supplier 1 URL: https://www.mouser.vn/ProductDetail/Microchip-Technology/MIC5219-3.3YM5-TR?qs=U6T8BxXiZAWojkIJMtSJlw%3D%3D; Supplier 2 URL: https://www.digikey.com/en/products/detail/microchip-technology/MIC5219-3-3YM5-TR/771750?s=N4IgTCBcDaILIEkDCBWMBGAnAWgMwDpcBNOFbAFQCUQBdAXyA; Supplier 3 URL: N/A; Value: MIC5219-3.3YM5-TR-3.3V, 500 mA; Voltage Output: 3.3V; Manufacturer Part Number: MIC5219-3.3YM5-TR; Mount: SMD/SMT; Operating Temperature Max: + 85 C; Operating Temperature Min: - 40 C; Supplier 1: Mouser; Supplier 1 Part Number: 998-MIC5219-3.3YM5TR; Supplier 2: Digi-Key; Supplier 2 Part Number: 576-1281-2-ND; Supplier 3: thegioiic; Supplier 3 Part Number: N/A; ComponentLink1Description: Datasheet; ComponentLink1URL: https://ww1.microchip.com/downloads/en/DeviceDoc/MIC5219-500mA-Peak-Output-LDO-Regulator-DS20006021A.pdf
footprint MIC5219-x.xYM5 (MIC5219-x.xYM5, SOT-23-5)
pins: 1 IN (in), 2 GND (power), 3 EN (in), 4 OUT (out), 5 ADJ (in)

## MIC5219-3.3YML-TRMLF-6
designator U?, comment MIC5219-3.3YML-TR-3V, 500 mA
MIC5219-x family LDO Voltage Regulators, 3.3V output; Manufacturer: Microchip; PSRR: 75 dB; Dropout Voltage: 350-600 mV; Voltage Output: 3V; Current Output: 500 mA; Voltage Input: 2.5V - 12V; Package / Case: MLF-6; Supplier 1 URL: https://www.mouser.vn/ProductDetail/Microchip-Technology/MIC5219-3.3YML-TR?qs=U6T8BxXiZAUE302TO%252BbaEg%3D%3D; Supplier 2 URL: https://www.digikey.com/en/products/detail/microchip-technology/MIC5219-3-3YML-TR/1030574?s=N4IgTCBcDaILIEkDCBWMBGAnAWgMwDpcBNOAGWwBUAlEAXQF8g; Supplier 3 URL: N/A; Value: MIC5219-3.3YML-TR-3V, 500 mA; Manufacturer Part Number: MIC5219-3.3YML-TR; Mount: SMD/SMT; Operating Temperature Max: + 85 C; Operating Temperature Min: - 40 C; Supplier 1: Mouser; Supplier 1 Part Number: 998-MIC5219-3.3YMLTR; Supplier 2: Digi-Key; Supplier 2 Part Number: 576-2768-2-NDQ; Supplier 3: thegioiic; Supplier 3 Part Number: N/A; ComponentLink1Description: Datasheet; ComponentLink1URL: https://ww1.microchip.com/downloads/en/DeviceDoc/MIC5219-500mA-Peak-Output-LDO-Regulator-DS20006021A.pdf
footprint MIC5219-x.xYML/MT (MIC5219-x.xYML/MT, 6-Pin MLF)
pins: 1 EN (in), 2 GND (power), 3 IN (in), 4 OUT (out), 5 ADJ (in), 6 BYP, 7 EP (power)

## MIC5219-3.3YMMMSOP-8
designator U?, comment MIC5219-3.3YMM-3.3V, 500 mA
MIC5219-x family LDO Voltage Regulators, 3.3V output; Manufacturer: Microchip; PSRR: 75 dB; Dropout Voltage: 350-600 mV; Current Output: 500 mA; Voltage Input: 2.5V - 12V; Package / Case: MSOP-8; Supplier 1 URL: https://www.mouser.vn/ProductDetail/Microchip-Technology/MIC5219-3.3YMM?qs=kh6iOki%2FeLEAgynv4GcWkQ%3D%3D; Supplier 2 URL: https://www.digikey.com/en/products/detail/microchip-technology/MIC5219-3-3YMM/1030575; Supplier 3 URL: N/A; Value: MIC5219-3.3YMM-3.3V, 500 mA; Voltage Output: 3.3V; Manufacturer Part Number: MIC5219-3.3YMM; Mount: SMD/SMT; Operating Temperature Max: + 85 C; Operating Temperature Min: - 40 C; Supplier 1: Mouser; Supplier 1 Part Number: 998-MIC5219-3.3YMM; Supplier 2: Digi-Key; Supplier 2 Part Number: 576-1827-5-ND; Supplier 3: thegioiic; Supplier 3 Part Number: N/A; ComponentLink1Description: Datasheet; ComponentLink1URL: https://ww1.microchip.com/downloads/en/DeviceDoc/MIC5219-500mA-Peak-Output-LDO-Regulator-DS20006021A.pdf
footprint MIC5219-x.xYMM (MIC5219-x.xYMM, SOT-23-5)
pins: 1 EN (in), 2 IN (in), 3 OUT (out), 4 BYPASS, 5 GND (power), 6 GND (power), 7 GND (power), 8 GND (power)

## MIC5219-3.6YM5-TRSOT-23-5
designator U?, comment MIC5219-3.6YM5-TR-3.6V, 500 mA
MIC5219-x family LDO Voltage Regulators, 3.6V output; Manufacturer: Microchip; PSRR: 75 dB; Dropout Voltage: 350-600 mV; Current Output: 500 mA; Voltage Input: 2.5V - 12V; Package / Case: SOT-23-5; Supplier 1 URL: https://www.mouser.vn/ProductDetail/Microchip-Technology/MIC5219-3.6YM5-TR?qs=U6T8BxXiZAWOHIj15bI33A%3D%3D; Supplier 2 URL: https://www.digikey.com/en/products/detail/microchip-technology/MIC5219-3-6YM5-TR/1030580?s=N4IgTCBcDaILIEkDCBWMBGAnAWgMwDoA2ATThWwBUAlEAXQF8g; Supplier 3 URL: N/A; Value: MIC5219-3.6YM5-TR-3.6V, 500 mA; Voltage Output: 3.6V; Manufacturer Part Number: MIC5219-3.6YM5-TR; Mount: SMD/SMT; Operating Temperature Max: + 85 C; Operating Temperature Min: - 40 C; Supplier 1: Mouser; Supplier 1 Part Number: 998-MIC5219-3.6YM5TR; Supplier 2: Digi-Key; Supplier 2 Part Number: 576-2769-2-ND; Supplier 3: thegioiic; Supplier 3 Part Number: N/A; ComponentLink1Description: Datasheet; ComponentLink1URL: https://ww1.microchip.com/downloads/en/DeviceDoc/MIC5219-500mA-Peak-Output-LDO-Regulator-DS20006021A.pdf
footprint MIC5219-x.xYM5 (MIC5219-x.xYM5, SOT-23-5)
pins: 1 IN (in), 2 GND (power), 3 EN (in), 4 OUT (out), 5 ADJ (in)

## MIC5219-3.6YMMMSOP-8
designator U?, comment MIC5219-3.6YMM-3.3V, 500 mA
MIC5219-x family LDO Voltage Regulators, 3.6V output; Manufacturer: Microchip; PSRR: 75 dB; Dropout Voltage: 350-600 mV; Voltage Output: 3.3V; Current Output: 500 mA; Voltage Input: 2.5V - 12V; Package / Case: MSOP-8; Supplier 1 URL: https://www.mouser.vn/ProductDetail/Microchip-Technology/MIC5219-3.6YMM?qs=kh6iOki%2FeLHQy6u%252Bz%2FlMaQ%3D%3D; Supplier 2 URL: https://www.digikey.com/en/products/detail/microchip-technology/MIC5219-3-6YMM/1030581; Supplier 3 URL: N/A; Value: MIC5219-3.6YMM-3.3V, 500 mA; Manufacturer Part Number: MIC5219-3.6YMM; Mount: SMD/SMT; Operating Temperature Max: + 85 C; Operating Temperature Min: - 40 C; Supplier 1: Mouser; Supplier 1 Part Number: 998-MIC5219-3.6YMM; Supplier 2: Digi-Key; Supplier 2 Part Number: MIC5219-3.6YMM-ND; Supplier 3: thegioiic; Supplier 3 Part Number: N/A; ComponentLink1Description: Datasheet; ComponentLink1URL: https://ww1.microchip.com/downloads/en/DeviceDoc/MIC5219-500mA-Peak-Output-LDO-Regulator-DS20006021A.pdf
footprint MIC5219-x.xYMM (MIC5219-x.xYMM, SOT-23-5)
pins: 1 EN (in), 2 IN (in), 3 OUT (out), 4 BYPASS, 5 GND (power), 6 GND (power), 7 GND (power), 8 GND (power)

## MIC5219-5.0YM5-TRSOT-23-5
designator U?, comment MIC5219-5.0YM5-TR-5.0V, 500 mA
MIC5219-x family LDO Voltage Regulators, 5.0V output; Manufacturer: Microchip; PSRR: 75 dB; Dropout Voltage: 350-600 mV; Current Output: 500 mA; Voltage Input: 2.5V - 12V; Package / Case: SOT-23-5; Supplier 1 URL: https://www.mouser.vn/ProductDetail/Microchip-Technology/MIC5219-5.0YM5-TR?qs=U6T8BxXiZAXThrqii9sAvA%3D%3D; Supplier 2 URL: https://www.digikey.com/en/products/detail/microchip-technology/MIC5219-5-0YM5-TR/1030586?s=N4IgTCBcDaILIEkDCBWMBGAnAWhQOgAYBNOFbAFQCUQBdAXyA; Supplier 3 URL: N/A; Value: MIC5219-5.0YM5-TR-5.0V, 500 mA; Voltage Output: 5.0V; Manufacturer Part Number: MIC5219-5.0YM5-TR; Mount: SMD/SMT; Operating Temperature Max: + 85 C; Operating Temperature Min: - 40 C; Supplier 1: Mouser; Supplier 1 Part Number: 998-MIC5219-5.0YM5TR; Supplier 2: Digi-Key; Supplier 2 Part Number: 576-2770-2-ND; Supplier 3: thegioiic; Supplier 3 Part Number: N/A; ComponentLink1Description: Datasheet; ComponentLink1URL: https://ww1.microchip.com/downloads/en/DeviceDoc/MIC5219-500mA-Peak-Output-LDO-Regulator-DS20006021A.pdf
footprint MIC5219-x.xYM5 (MIC5219-x.xYM5, SOT-23-5)
pins: 1 IN (in), 2 GND (power), 3 EN (in), 4 OUT (out), 5 ADJ (in)

## MIC5219-5.0YMMMSOP-8
designator U?, comment MIC5219-5.0YMM-5V, 500 mA
MIC5219-x family LDO Voltage Regulators, 5.0V output; Manufacturer: Microchip; PSRR: 75 dB; Dropout Voltage: 350-600 mV; Voltage Output: 5V; Current Output: 500 mA; Voltage Input: 2.5V - 12V; Package / Case: MSOP-8; Supplier 1 URL: https://www.mouser.vn/ProductDetail/Microchip-Technology/MIC5219-5.0YMM?qs=kh6iOki%2FeLGcAZQ4JCOeow%3D%3D; Supplier 2 URL: https://www.digikey.com/en/products/detail/microchip-technology/MIC5219-5-0YMM/1030587; Supplier 3 URL: N/A; Value: MIC5219-5.0YMM-5V, 500 mA; Manufacturer Part Number: MIC5219-5.0YMM; Mount: SMD/SMT; Operating Temperature Max: + 85 C; Operating Temperature Min: - 40 C; Supplier 1: Mouser; Supplier 1 Part Number: 998-MIC5219-5.0YMM; Supplier 2: Digi-Key; Supplier 2 Part Number: 576-1828-5-ND; Supplier 3: thegioiic; Supplier 3 Part Number: N/A; ComponentLink1Description: Datasheet; ComponentLink1URL: https://ww1.microchip.com/downloads/en/DeviceDoc/MIC5219-500mA-Peak-Output-LDO-Regulator-DS20006021A.pdf
footprint MIC5219-x.xYMM (MIC5219-x.xYMM, SOT-23-5)
pins: 1 EN (in), 2 IN (in), 3 OUT (out), 4 BYPASS, 5 GND (power), 6 GND (power), 7 GND (power), 8 GND (power)

## MIC5219-5.0YMT-TRMLF-6
designator U?, comment MIC5219-5.0YMT-TR-5V, 500 mA
MIC5219-x family LDO Voltage Regulators, 5.0V output; Manufacturer: Microchip; PSRR: 75 dB; Dropout Voltage: 350-600 mV; Voltage Output: 5V; Current Output: 500 mA; Voltage Input: 2.5V - 12V; Package / Case: MLF-6; Supplier 1 URL: https://www.mouser.vn/ProductDetail/Microchip-Technology/MIC5219-5.0YMT-TR?qs=U6T8BxXiZAUlqYSj5RtOQw%3D%3D; Supplier 2 URL: https://www.digikey.com/en/products/detail/microchip-technology/MIC5219-5-0YMT-TR/2095492?s=N4IgTCBcDaILIEkDCBWMBGAnAWhQOgAYBNOAFW1ICUQBdAXyA; Supplier 3 URL: N/A; Value: MIC5219-5.0YMT-TR-5V, 500 mA; Manufacturer Part Number: MIC5219-5.0YMT-TR; Mount: SMD/SMT; Operating Temperature Max: + 85 C; Operating Temperature Min: - 40 C; Supplier 1: Mouser; Supplier 1 Part Number: 998-MIC5219-5.0YMTTR; Supplier 2: Digi-Key; Supplier 2 Part Number: 576-3521-2-ND; Supplier 3: thegioiic; Supplier 3 Part Number: N/A; ComponentLink1Description: Datasheet; ComponentLink1URL: https://ww1.microchip.com/downloads/en/DeviceDoc/MIC5219-500mA-Peak-Output-LDO-Regulator-DS20006021A.pdf
footprint MIC5219-x.xYML/MT (MIC5219-x.xYML/MT, 6-Pin MLF)
pins: 1 EN (in), 2 GND (power), 3 IN (in), 4 OUT (out), 5 ADJ (in), 6 NC, 7 EP (power)


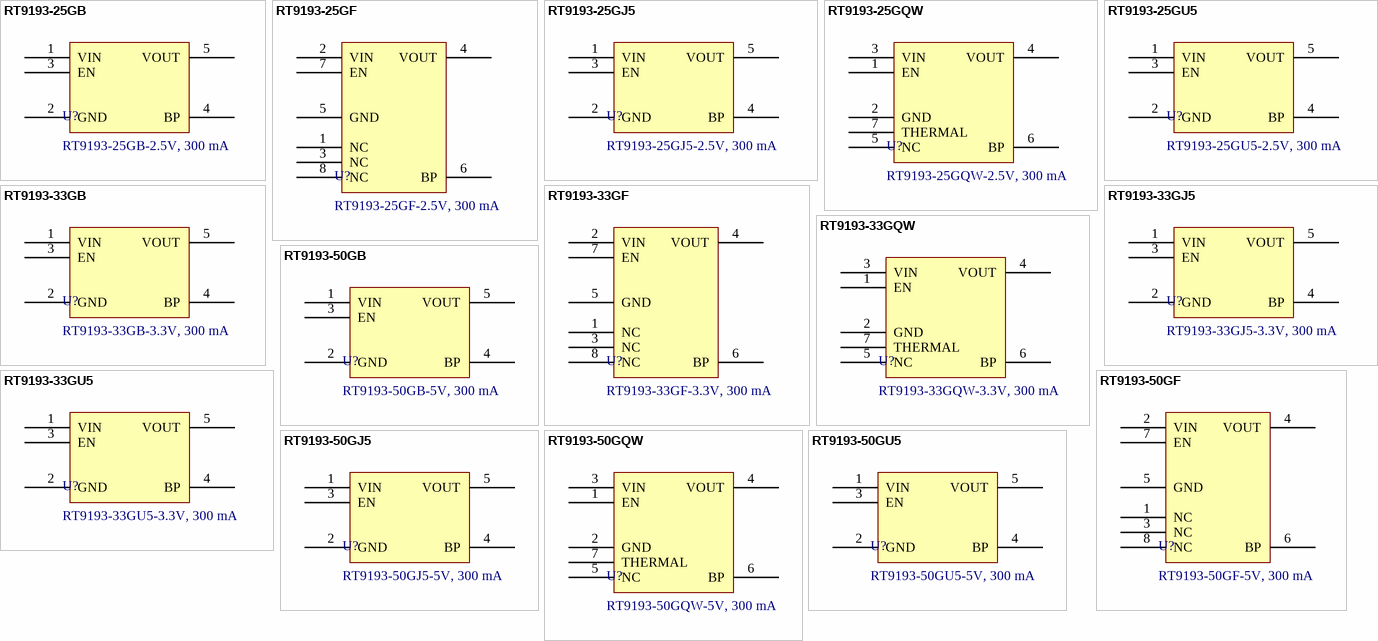
[diagram p8: symbols RT9193-25GB to RT9193-50GU5]

## RT9193-25GB
designator U?, comment RT9193-25GB-2.5V, 300 mA
LDO Voltage Regulators 300mA, Ultra-Low Noise, Ultra-Fast CMOS LDO Regulator, SOT-23-5, 2.5 V; Manufacturer: Richtek; Voltage Output: 2.5V; Rated Current: 90 uA; PSRR: - 70 dB; Voltage Drop: 220 mV; Voltage Input Maximum: 5.5V; Packaging: Tape and Reel; Current Output: 300 mA; Voltage Input Minimum: 2.5V; Product: LDO Voltage Regulators; Supplier 1 URL: https://www.mouser.vn/ProductDetail/Richtek/RT9193-25GB?qs=amGC7iS6iy%252BWegPok0BkoQ%3D%3D; Supplier 2 URL: https://www.digikey.com/en/products/detail/richtek-usa-inc/RT9193-25GB/2470049?s=N4IgTCBcDaIEoBUCcBGJBmAtGArAcQCEQBdAXyA; Supplier 3 URL: N/A; Value: RT9193-25GB-2.5V, 300 mA; Manufacturer Part Number: RT9193-25GB; Mount: SMD/SMT; Operating Temperature Max: + 85 C; Operating Temperature Min: - 40 C; Package / Case: SOT-23-5; Supplier 1: Mouser; Supplier 1 Part Number: 835-RT9193-25GB; Supplier 2: Digi-Key; Supplier 2 Part Number: 1028-1015-6-ND; Supplier 3: thegioiic; Supplier 3 Part Number: N/A; ComponentLink1Description: Datasheet; ComponentLink1URL: https://www.mouser.vn/datasheet/2/1458/DS9193_18-3104722.pdf; LCSC Part #: C55115
footprint RT9193-xxGB (SOT23, 5-Leads, Body 2.90x2.79mm, Pitch 0.95mm, IPC Medium Density)
pins: 1 VIN (power), 2 GND (power), 3 EN (power), 4 BP (power), 5 VOUT (power)

## RT9193-25GF
designator U?, comment RT9193-25GF-2.5V, 300 mA
LDO Voltage Regulators 300mA, Ultra-Low Noise, Ultra-Fast CMOS LDO Regulator, MSOP-8, 2.5V; Manufacturer: Richtek; PSRR: - 70 dB; Rated Current: 90 uA; Voltage Drop: 220 mV; Voltage Input Maximum: 5.5V; Product: LDO Voltage Regulators; Packaging: Tape and Reel; Voltage Output: 2.5V; Current Output: 300 mA; Voltage Input Minimum: 2.5V; Supplier 1 URL: N/A; Supplier 2 URL: https://www.digikey.com/en/products/detail/richtek-usa-inc/RT9193-25GF/2546923?s=N4IgTCBcDaIEoBUCcBGJBmAtGArAcQDEQBdAXyA; Supplier 3 URL: N/A; Value: RT9193-25GF-2.5V, 300 mA; Manufacturer Part Number: RT9193-25GF; Mount: SMD/SMT; Operating Temperature Max: + 85 C; Operating Temperature Min: - 40 C; Package / Case: MSOP-8; Supplier 1: Mouser; Supplier 1 Part Number: N/A; Supplier 2: Digi-Key; Supplier 2 Part Number: RT9193-25GF-ND; Supplier 3: thegioiic; Supplier 3 Part Number: N/A; ComponentLink1Description: Datasheet; ComponentLink1URL: https://www.mouser.vn/datasheet/2/1458/DS9193_18-3104722.pdf; LCSC Part #: N/A
footprint RT9193-xxGF (TSOP, 8-Leads, Body 3.00x3.00mm, Pitch 0.65mm, IPC Medium Density)
pins: 1 NC (power), 2 VIN (power), 3 NC (power), 4 VOUT (power), 5 GND (power), 6 BP (power), 7 EN (power), 8 NC (power)